# Altium footprint library 1.40-晶振、晶体.PcbLib: 43 footprints (part 2 of 3)
Each footprint in its own frame and in the unit in brackets; x right, y up, seen from the top. Pads: shape width x height; smd on the part's side, far side on the other; paste and mask are expansions set on the pad; w line width, h text height; cw(c..) or ccw(c..) is an arc to the next point about the centre after c.
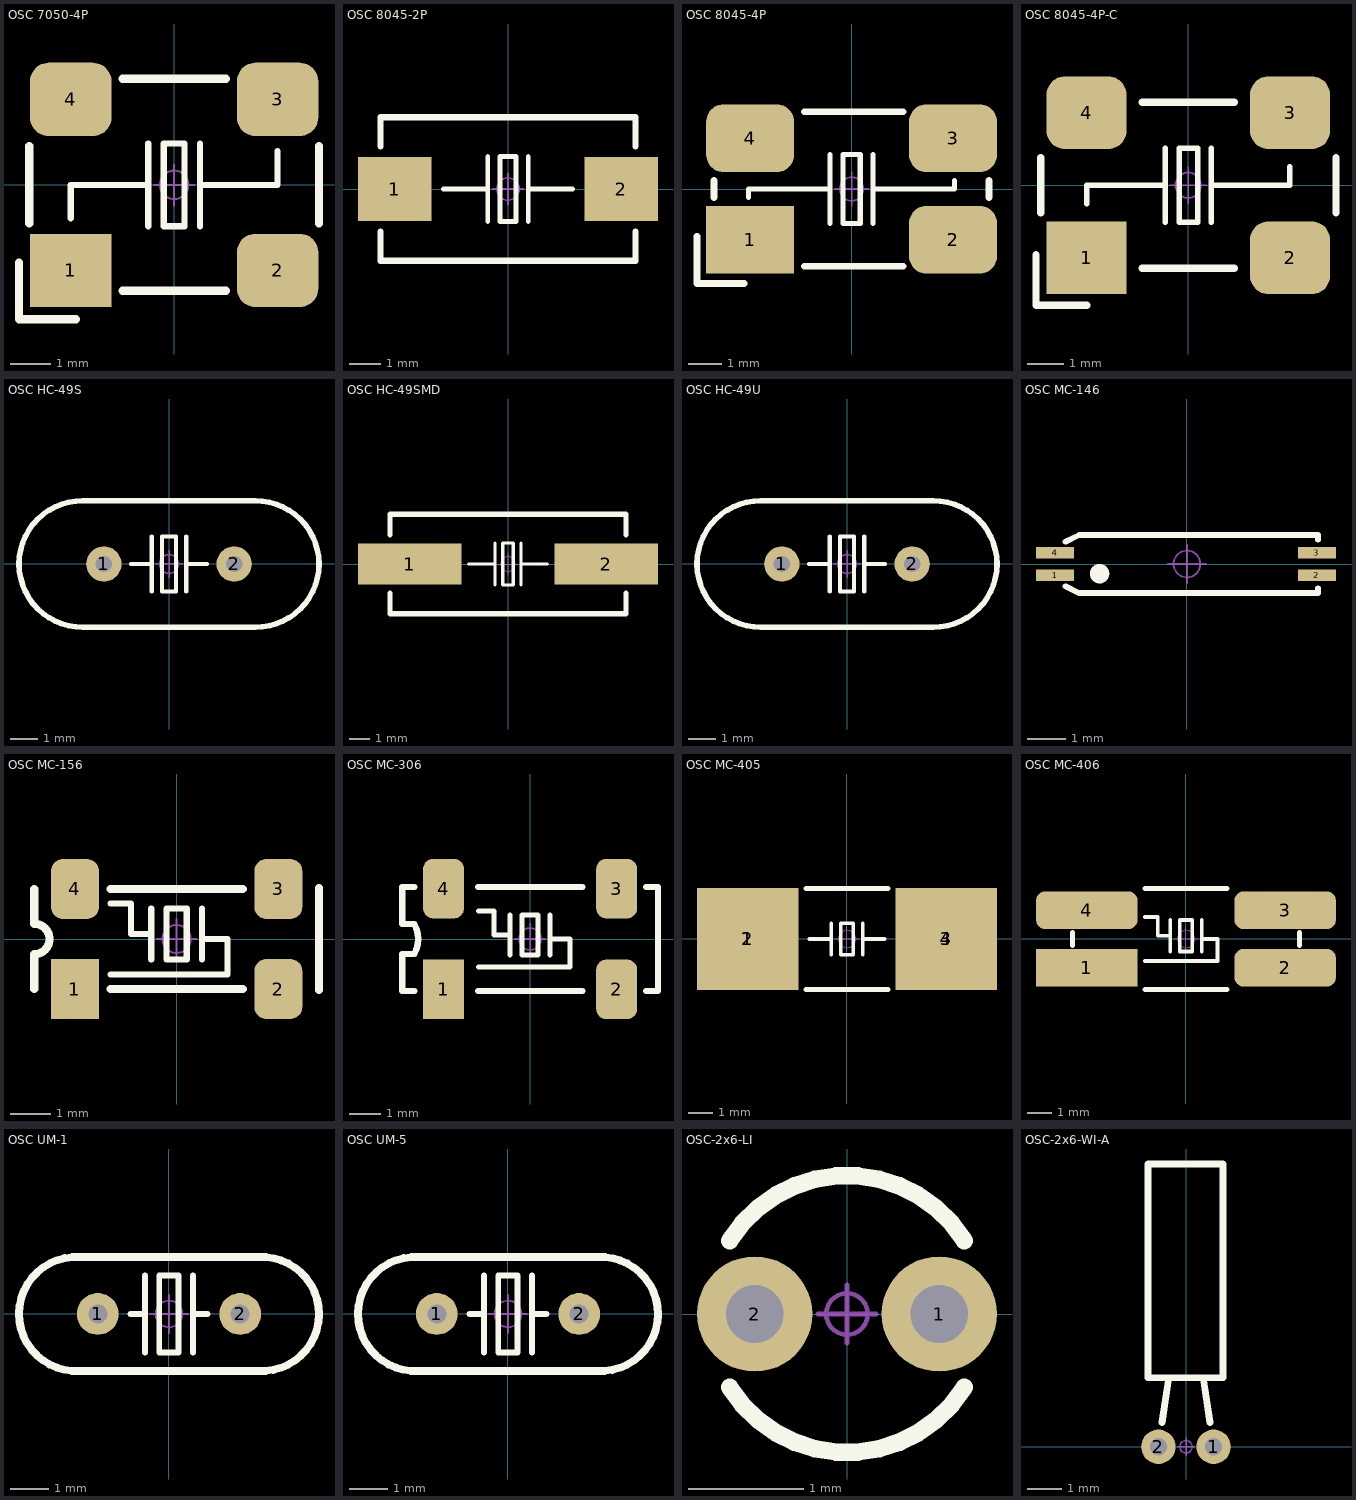
[diagram p1: the footprints below, top view; thin cyan lines are the x and y axes]

## OSC 7050-4P [mm] "7mm*5mm*1.3mm(长*宽*高)"
pads (4):
  rect 2x1.8 smd: 1(-2.54,-2.1)
  rrect50% 2x1.8 smd: 2(2.54,-2.1) 3(2.54,2.1) 4(-2.54,2.1)
Top Overlay:
  lines w0.152: -2.54,-0.821 -2.54,0 -1.397,0 -0.635,0 ; -0.635,-1.016 -0.635,1.016 ; 0.635,-1.016 0.635,1.016 ; 0.635,0 1.397,0 2.54,0 2.54,0.83 ; -0.254,-1.016 -0.254,1.016 0.254,1.016 0.254,-1.016 -0.254,-1.016
  lines w0.203: -3.81,-1.905 -3.81,-3.302 -2.413,-3.302 ; -3.556,-0.948 -3.556,0.957 ; -1.27,-2.599 1.27,-2.599 ; -1.27,2.608 1.27,2.608 ; 3.556,-0.948 3.556,0.957
Mechanical 15:
  circle w0.05: c0,0 r0.35
  lines w0.05: -0.5,0 0.5,0 ; 0,-0.5 0,0.5
3D body "OSC 7050-4.STEP": height 1.36, standoff 0.03, extent -3.5,-2.5 3.5,2.5

## OSC 8045-2P [mm] "8mm*4.5mm*1.8mm(长*宽*高)                 淘宝ID:黄晶宝石"
pads (2):
  rect 2.3x2 smd: 1(-3.556,0) 2(3.556,0)
Top Overlay:
  lines w0.152: -2.032,0 -0.635,0 ; -0.635,-1.016 -0.635,1.016 ; 0.635,-1.016 0.635,1.016 ; 0.635,0 2.032,0 ; -0.254,-1.016 0.254,-1.016 0.254,1.016 -0.254,1.016 -0.254,-1.016
  lines w0.203: -4,-1.334 -4,-2.25 4,-2.25 4,-1.334 ; -4,1.334 -4,2.25 4,2.25 4,1.334
Mechanical 15:
  circle w0.05: c0,0 r0.35
  lines w0.05: -0.5,0 0.5,0 ; 0,-0.5 0,0.5
3D body "OSC 8045-2.STEP": height 1.85, standoff 0.03, extent -4,-2.25 4,2.25

## OSC 8045-4P [mm] "8mm*4.5mm*1.6mm(长*宽*高)"
pads (4):
  rect 2.6x2 smd: 1(-3,-1.5)
  rrect50% 2.6x2 smd: 2(3,-1.5) 3(3,1.5) 4(-3,1.5)
Top Overlay:
  lines w0.152: -3.048,-0.254 -3.048,0 -1.397,0 -0.635,0 ; -0.635,-1.016 -0.635,1.016 ; 0.635,-1.016 0.635,1.016 ; 0.635,0 1.397,0 3.048,0 3.048,0.254 ; -0.254,-1.016 0.254,-1.016 0.254,1.016 -0.254,1.016 -0.254,-1.016
  lines w0.203: -4.572,-1.397 -4.572,-2.794 -3.175,-2.794 ; -4.064,-0.254 -4.064,0.254 ; -1.397,-2.286 1.524,-2.286 ; -1.397,2.286 1.524,2.286 ; 4.064,-0.254 4.064,0.254
Mechanical 15:
  circle w0.05: c0,0 r0.35
  lines w0.05: -0.5,0 0.5,0 ; 0,-0.5 0,0.5
3D body "OSC 8045-4-A.STEP": height 1.66, standoff 0.03, extent -4,-2.25 4,2.25

## OSC 8045-4P-C [mm] "8mm*4.5mm*1.8mm(长*宽*高)                    淘宝ID:黄晶宝石"
pads (4):
  rect 2.2x2 smd: 1(-2.8,-1.996)
  rrect50% 2.2x2 smd: 2(2.8,-1.996) 3(2.8,1.996) 4(-2.8,1.996)
Top Overlay:
  lines w0.152: -2.794,-0.508 -2.794,0 -1.397,0 -0.635,0 ; -0.635,-1.016 -0.635,1.016 ; 0.635,-1.016 0.635,1.016 ; 0.635,0 1.397,0 2.794,0 2.794,0.508 ; -0.254,-1.016 0.254,-1.016 0.254,1.016 -0.254,1.016 -0.254,-1.016
  lines w0.203: -4.191,-1.905 -4.191,-3.302 -2.794,-3.302 ; -4.064,-0.762 -4.064,0.762 ; -1.27,-2.286 1.27,-2.286 ; -1.27,2.286 1.27,2.286 ; 4.064,-0.762 4.064,0.762
Mechanical 15:
  circle w0.05: c0,0 r0.35
  lines w0.05: -0.5,0 0.5,0 ; 0,-0.5 0,0.5
3D body "OSC 8045-4.STEP": height 2.05, standoff 0.03, extent -4,-2.25 4,2.25

## OSC HC-49S [mm] "封装库来自淘宝卖家 ID：黄晶宝石"
pads (2):
  round 1.3 hole 0.6: 1(-2.4,0) 2(2.4,0)
Top Overlay:
  lines w0.152: -1.397,0 -0.635,0 ; -0.635,-1.016 -0.635,1.016 ; 0.635,-1.016 0.635,1.016 ; 0.635,0 1.397,0 ; -0.254,-1.016 0.254,-1.016 0.254,1.016 -0.254,1.016 -0.254,-1.016
  lines w0.203: -3.175,2.325 ccw(c-3.2,0) -3.173,-2.325 3.175,-2.325 ccw(c3.2,0) 3.173,2.325 -3.175,2.325
Mechanical 15:
  circle w0.05: c0,0 r0.35
  lines w0.05: -0.5,0 0.5,0 ; 0,-0.5 0,0.5
3D body "OSC HC-49S.STEP": height 4.13, standoff -3.45, extent -5.525,-2.325 5.525,2.325

## OSC HC-49SMD [mm] "封装库来自淘宝卖家 ID：黄晶宝石"
pads (2):
  rect 5x2 smd: 1(-4.75,0) 2(4.75,0)
Top Overlay:
  lines w0.152: -1.905,0 -0.635,0 ; -0.635,-1.016 -0.635,1.016 ; 0.635,-1.016 0.635,1.016 ; 0.635,0 1.905,0 ; -0.254,-1.016 0.254,-1.016 0.254,1.016 -0.254,1.016 -0.254,-1.016
  lines w0.254: -5.7,-1.397 -5.7,-2.4 5.7,-2.4 5.7,-1.397 ; -5.7,1.397 -5.7,2.4 5.7,2.4 5.7,1.397
Mechanical 15:
  circle w0.05: c0,0 r0.35
  lines w0.05: -0.5,0 0.5,0 ; 0,-0.5 0,0.5
3D body "OSC HC-49SMD.STEP": height 4.63, standoff 0.03, extent -6.5,-2.325 6.5,2.325

## OSC HC-49U [mm] "封装库来自淘宝卖家 ID：黄晶宝石"
pads (2):
  round 1.3 hole 0.6: 1(-2.4,0) 2(2.4,0)
Top Overlay:
  lines w0.152: -1.397,0 -0.635,0 ; -0.635,-1.016 -0.635,1.016 ; 0.635,-1.016 0.635,1.016 ; 0.635,0 1.397,0 ; -0.254,-1.016 0.254,-1.016 0.254,1.016 -0.254,1.016 -0.254,-1.016
  lines w0.203: -3.175,2.325 ccw(c-3.2,0) -3.173,-2.325 3.175,-2.325 ccw(c3.2,0) 3.173,2.325 -3.175,2.325
Mechanical 15:
  circle w0.05: c0,0 r0.35
  lines w0.05: -0.5,0 0.5,0 ; 0,-0.5 0,0.5
3D body "OSC HC-49U.STEP": height 13.95, standoff -3.45, extent -5.525,-2.325 5.525,2.325

## OSC MC-146 [mm] "6.7mm*1.5mm*1.4mm(长*宽*高)          淘宝ID:黄晶宝石"
pads (4):
  rect 1x0.3 smd: 1(-3.45,-0.3) 2(3.4,-0.3) 3(3.4,0.3) 4(-3.45,0.3)
Top Overlay:
  circle w0.254: c-2.286,-0.254 r0.127
  lines w0.152: -3.175,-0.584 -2.819,-0.762 3.429,-0.762 3.429,-0.635 ; -3.175,0.584 -2.819,0.762 3.429,0.762 3.429,0.635
Mechanical 15:
  circle w0.05: c0,0 r0.35
  lines w0.05: -0.5,0 0.5,0 ; 0,-0.5 0,0.5
3D body "OSC MC-146.STEP": height 1.45, standoff 0.04, extent -3.45,-0.75 3.45,0.75

## OSC MC-156 [mm] "7.1mm*2.5mm*1.5mm(长*宽*高)"
pads (4):
  rect 1.2x1.5 smd: 1(-2.54,-1.25)
  rrect50% 1.2x1.5 smd: 2(2.54,-1.25) 3(2.54,1.25) 4(-2.54,1.25)
Top Overlay:
  lines w0.152: -1.651,-0.889 1.27,-0.889 1.27,0 0.635,0 ; -1.651,0.889 -1.143,0.889 -1.143,0.127 -0.889,0.127 -0.635,0.127 ; -0.635,-0.508 -0.635,0.762 ; 0.635,-0.508 0.635,0.762 ; -0.254,-0.508 0.254,-0.508 0.254,0.762 -0.254,0.762 -0.254,-0.508
  lines w0.203: -3.556,-1.25 -3.556,-0.381 ccw(c-3.556,0) -3.556,0.381 -3.556,1.25 ; -1.651,-1.25 1.651,-1.25 ; -1.651,1.25 1.651,1.25 ; 3.556,-1.27 3.556,1.27
Mechanical 15:
  circle w0.05: c0,0 r0.35
  lines w0.05: -0.5,0 0.5,0 ; 0,-0.5 0,0.5
3D body "OSC MC-156-4.STEP": height 1.5, standoff 0.03, extent -3.55,-1.65 3.55,1.65

## OSC MC-306 [mm] "8mm*3.2mm*2.54mm(长*宽*高)"
pads (4):
  rect 1.3x1.9 smd: 1(-2.75,-1.6)
  rrect50% 1.3x1.9 smd: 2(2.75,-1.6) 3(2.75,1.6) 4(-2.75,1.6)
Top Overlay:
  lines w0.152: -1.651,-0.889 1.27,-0.889 1.27,0 0.635,0 ; -1.651,0.889 -1.143,0.889 -1.143,0.127 -0.889,0.127 -0.635,0.127 ; -0.635,-0.508 -0.635,0.762 ; 0.635,-0.508 0.635,0.762 ; -0.254,-0.508 -0.254,0.762 0.254,0.762 0.254,-0.508 -0.254,-0.508
  lines w0.203: -3.683,-1.651 -4.064,-1.651 -4.064,-0.476 -3.683,-0.476 ccw(c-4.512,0) -3.683,0.476 -4.064,0.476 -4.064,1.651 -3.683,1.651 ; -1.651,-1.651 1.651,-1.651 ; -1.651,1.651 1.651,1.651 ; 3.683,-1.651 4.064,-1.651 4.064,1.651 3.683,1.651
Mechanical 15:
  circle w0.05: c0,0 r0.35
  lines w0.05: -0.5,0 0.5,0 ; 0,-0.5 0,0.5
3D body "OSC MC-306-4.STEP": height 2.56, standoff 0, extent -4,-1.63 4,1.63

## OSC MC-405 [mm] "9.6mm*4.06mm*3.6mm(长*宽*高)"
pads (4):
  rect 4.1x4.1 smd: 1(-4,0) 2(-4,0) 3(4,0) 4(4,0)
Top Overlay:
  lines w0.152: -1.524,0 -0.889,0 -0.635,0 ; -0.635,-0.635 -0.635,0.635 ; 0.635,-0.635 0.635,0.635 ; 0.635,0 1.524,0 ; -0.254,-0.635 -0.254,0.635 0.254,0.635 0.254,-0.635 -0.254,-0.635
  lines w0.203: -1.651,-2.032 1.651,-2.032 ; -1.651,2.032 1.651,2.032
Mechanical 15:
  circle w0.05: c0,0 r0.35
  lines w0.05: -0.5,0 0.5,0 ; 0,-0.5 0,0.5
3D body "OSC MC-406-4.STEP": height 3.4, standoff -0.05, extent -5.15,-2.03 5.15,2.03

## OSC MC-406 [mm] "9.6mm*4.06mm*3.6mm(长*宽*高)          淘宝ID:黄晶宝石"
pads (4):
  rect 4.1x1.52 smd: 1(-4,-1.16)
  rrect50% 4.1x1.52 smd: 2(4,-1.16) 3(4,1.16) 4(-4,1.16)
Top Overlay:
  lines w0.152: -1.651,-0.889 1.27,-0.889 1.27,0 0.635,0 ; -1.651,0.889 -1.143,0.889 -1.143,0.127 -0.889,0.127 -0.635,0.127 ; -0.635,-0.508 -0.635,0.762 ; 0.635,-0.508 0.635,0.762 ; -0.254,-0.508 -0.254,0.762 0.254,0.762 0.254,-0.508 -0.254,-0.508
  lines w0.203: -4.572,-0.254 -4.572,0.254 ; -1.651,-2.032 1.651,-2.032 ; -1.651,2.032 1.651,2.032 ; 4.572,-0.254 4.572,0.254
Mechanical 15:
  circle w0.05: c0,0 r0.35
  lines w0.05: -0.5,0 0.5,0 ; 0,-0.5 0,0.5
3D body "OSC MC-406-4.STEP": height 3.4, standoff -0.05, extent -5.15,-2.03 5.15,2.03

## OSC UM-1 [mm] "封装库来自淘宝卖家 ID：黄晶宝石"
pads (2):
  round 1.1 hole 0.5: 1(-1.875,0) 2(1.875,0)
Top Overlay:
  lines w0.152: -1.016,0 -0.635,0 ; -0.635,-1.016 -0.635,1.016 ; 0.635,-1.016 0.635,1.016 ; 0.635,0 1.016,0 ; -0.254,-1.016 -0.254,1.016 0.254,1.016 0.254,-1.016 -0.254,-1.016
  lines w0.203: -2.556,-1.5 2.54,-1.5 ccw(c2.452,-0.003) 2.558,1.493 ; -2.556,-1.496 cw(c-2.45,0) -2.538,1.497 ; -2.538,1.5 2.558,1.5
Mechanical 15:
  circle w0.05: c0,0 r0.35
  lines w0.05: -0.5,0 0.5,0 ; 0,-0.5 0,0.5
3D body "OSC UM-1.STEP": height 8.05, standoff -3.45, extent -3.95,-1.5 3.95,1.5

## OSC UM-5 [mm] "淘宝ID:黄晶宝石                          淘宝ID:黄晶宝石"
pads (2):
  round 1.1 hole 0.5: 1(-1.875,0) 2(1.875,0)
Top Overlay:
  lines w0.152: -1.016,0 -0.635,0 ; -0.635,-1.016 -0.635,1.016 ; 0.635,-1.016 0.635,1.016 ; 0.635,0 1.016,0 ; -0.254,-1.016 0.254,-1.016 0.254,1.016 -0.254,1.016 -0.254,-1.016
  lines w0.203: -2.556,-1.5 2.54,-1.5 ccw(c2.452,-0.003) 2.558,1.493 ; -2.556,-1.496 cw(c-2.45,0) -2.538,1.497 ; -2.538,1.5 2.558,1.5
Mechanical 15:
  circle w0.05: c0,0 r0.35
  lines w0.05: -0.5,0 0.5,0 ; 0,-0.5 0,0.5
3D body "OSC UM-5.STEP": height 6.05, standoff -3.45, extent -3.95,-1.5 3.95,1.5

## OSC-2x6-LI [mm] "脚距：1.6mm                  淘宝ID:黄晶宝石"
pads (2):
  round 1 hole 0.5: 1(0.8,0) 2(-0.8,0)
Top Overlay:
  lines w0.152: -1.018,-0.636 ccw(c0,0) 1.018,-0.636 ; -1.018,0.636 cw(c0,0) 1.018,0.636
Mechanical 15:
  circle w0.04: c0,0 r0.18
  lines w0.04: -0.254,0 0.254,0 ; 0,-0.254 0,0.254
3D body "OSC-2x6-LI.STEP": height 7.1, standoff -2.45, extent -1,-1 1,1

## OSC-2x6-WI-A [mm] "脚距：1.6mm"
pads (2):
  round 1 hole 0.5: 1(0.8,0) 2(-0.8,0)
Top Overlay:
  lines w0.2: -0.7,0.7 -0.5,2 ; 0.5,2 0.7,0.7 ; -1.1,2 1.072,2 1.072,8.2 -1.1,8.2 -1.1,2
Mechanical 15:
  circle w0.04: c0,0 r0.18
  lines w0.04: -0.254,0 0.254,0 ; 0,-0.254 0,0.254
3D body "OSC-2x6-WI.STEP": height 2.05, standoff -2.6, extent -1,-0.157 1,8